# Altium integrated library Capacitor.IntLib: 81 symbols (part 2 of 2)
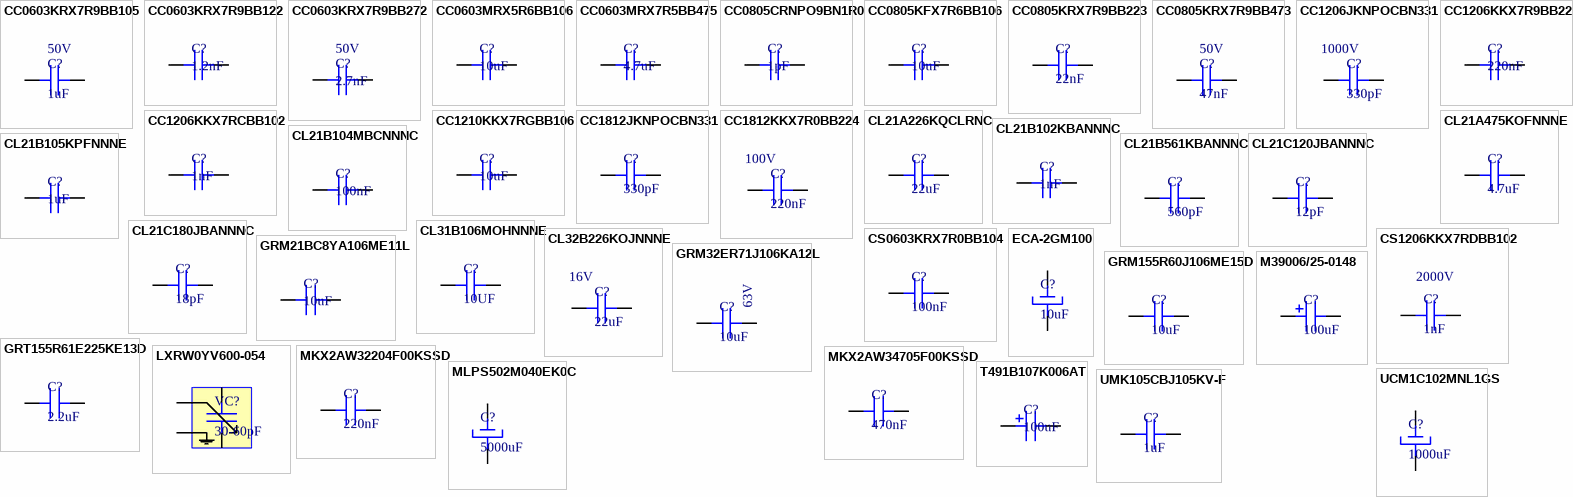
[diagram p3: symbols CC0603KRX7R9BB105 to UMK105CBJ105KV-F]

## GRM21BC8YA106ME11L
designator C?, comment 10uF
10uF, 35V, X6S, 0805; Manufacturer: Murata; Manufacturer Part Number: GRM21BC8YA106ME11L; Tolerance: 20%; Value: 10000000; Dielectric Material: Ceramic; Purpose Of Usage: BASIC; Working Voltage: 0; Supplier 1: Digi-Key; Supplier Part Number 1: 490-10505-1-ND; RoHS: YES; Mount: SMD; Case/Package: 0805; Case Code (Imperial): 0805; Case Code (Metric): 2012; Min Operating Temperature: -55°C; Max Operating Temperature: 105°C; Voltage Rating: 35V; Voltage Rating (DC): 35V; Dielectric: X6S; Category: CAPASITOR; Sub-Category: CERAMIC; Stock ID: ??; Local Supplier: GENERAL; Price 10K: 0.00250
footprint C0805
pins: 1, 2

## GRM32ER71J106KA12L
designator C?, comment 10uF  Voltage Rating: 63V
10uF , 1210,  X7R, 63V; Manufacturer: Murata; Manufacturer Part Number: GRM32ER71J106KA12L; Dielectric Material: Ceramic; Purpose Of Usage: BASIC; Tolerance: 10%; Value: 100000000; Working Voltage: 0; RoHS: YES; Category: CAPASITOR; Case/Package: 1210; Case Code (Imperial): 1210; Case Code (Metric): 3225; Dielectric: X7R; Local Supplier: GENERAL; Max Operating Temperature: 125°C; Min Operating Temperature: -55°C; Mount: SMD; Price 10K: 0,5; Stock ID: ??; Sub-Category: CERAMIC; Supplier 1: Digi-Key; Voltage Rating (DC): 63V
footprint C1210
pins: 1, 2

## GRM155R60J106ME15D
designator C?, comment 10uF
10uF, 6.3V, X5R, 0402; Manufacturer: Murata; Manufacturer Part Number: GRM155R60J106ME15D; Value: 10000000; Tolerance: 20%; Dielectric Material: Ceramic; Purpose Of Usage: BASIC; Working Voltage: 0; Supplier 1: Digi-Key; RoHS: YES; Category: CAPASITOR; Mount: SMD; Case/Package: 0402; Case Code (Metric): 1005; Case Code (Imperial): 0402; Min Operating Temperature: -55°C; Max Operating Temperature: 85°C; Voltage Rating: 6.3V; Voltage Rating (DC): 6.3V; Dielectric: X5R; Supplier Part Number 1: 490-13238-1-ND; Sub-Category: CERAMIC; Stock ID: ??; Local Supplier: GENERAL; Price 10K: 0.00250
footprint C0402 (Chip Capacitor, 2-Leads, Body 1.00x0.50mm, IPC Medium Density)
pins: 1, 2

## GRT155R61E225KE13D
designator C?, comment 2.2uF
2.2uF, 25V, X5R, 0402; Manufacturer: Murata; Manufacturer Part Number: GRT155R61E225KE13D; Value: 2200000; Tolerance: 10%; Dielectric Material: Ceramic; Purpose Of Usage: BASIC; Working Voltage: 0; Supplier 1: Digi-Key; RoHS: YES; Category: CAPASITOR; Mount: SMD; Case/Package: 0402; Case Code (Metric): 1005; Case Code (Imperial): 0402; Min Operating Temperature: -55°C; Max Operating Temperature: 85°C; Voltage Rating: 25V; Dielectric: X5R; Voltage Rating (DC): 25V; Supplier Part Number 1: 490-12267-1-ND; Sub-Category: CERAMIC; Stock ID: ??; Local Supplier: GENERAL; Price 10K: 0.00250
footprint C0402 (Chip Capacitor, 2-Leads, Body 1.00x0.50mm, IPC Medium Density)
pins: 1, 2

## LXRW0YV600-054
designator VC?, comment 30-60pF
60pF 3.2V 4-Pin Surface Mount T/R; Manufacturer: Murata; Manufacturer Part Number: LXRW0YV600-054; Value: 30; Voltage Rating: 50V; Purpose Of Usage: BASIC; Working Voltage: 0; Supplier 1: Digi-Key; RoHS: YES; Category: CAPASITOR; Supplier Part Number 1: 490-18379-2-ND; Case/Package: SMD/SMT; Case Code (Imperial): SMD; Max Operating Temperature: 85°C; Min Operating Temperature: -55°C; Mount: SMD; Stock ID: ??; Sub-Category: TRIMMER; Voltage Rating (DC): 3.2V; Local Supplier: GENERAL; Price 10K: 0.00250
footprint LXRW0YV600-054
pins: 1 GND, 2 ADJ, 3, 4

## M39006/25-0148
designator C?, comment 100uF
100uF, 63V, %10, ,WetTantalum, THT, MIL-PRF-39006; Manufacturer: Vishay Sprague; Manufacturer Part Number: M39006/25-0148; Voltage Rating: 60V; Tolerance: 10%; Value: 100000000; Purpose Of Usage: BASIC; Working Voltage: 0; RoHS: YES; Category: CAPASITOR; Case/Package: Axial; Min Operating Temperature: -55°C; Max Operating Temperature: 125°C; Mount: SMD; Supplier 1: Digi-Key; Case Code (Imperial): THT; Case Code (Metric): THT; Diameter: 7.92mm; Dielectric: Tantalum; Dielectric Material: Tantalum; Height: 7.92mm; Stock ID: ??; Sub-Category: TANTALUM; Supplier Part Number 1: 1129-M39006/25-0148-ND; Voltage Rating (DC): 60V
footprint CAP_06/22-0002_VIS
pins: 1, 2

## MKX2AW32204F00KSSD
designator C?, comment 220nF
220nF, 630V, %10, THT, X2; Manufacturer: WIMA; Manufacturer Part Number: MKX2AW32204F00KSSD; Dielectric: Polypropylene (PP), Metallized; Purpose Of Usage: BASIC; Tolerance: 10%; Value: 220000; Working Voltage: 0; RoHS: YES; Category: CAPASITOR; Case/Package: Radial; Case Code (Imperial): THT; Case Code (Metric): Radial; Dielectric Material: Polypropylene (PP), Metallized; Height: 15mm; Local Supplier: GENERAL; Max Operating Temperature: 105°C; Min Operating Temperature: -55°C; Mount: THT; MSL: 1; Stock ID: ??; Sub-Category: FILM CAPASITOR; Supplier 1: Digi-Key; Supplier Part Number 1: 1928-1773-ND; Voltage Rating (DC): 630V; Voltage Rating: 630V; Price 10K: 0,5
footprint 18x9x15_L15_Film_Cap
pins: 1, 2

## MKX2AW34705F00KSSD
designator C?, comment 470nF
470nF, 630V, %10, THT, X2; Manufacturer: WIMA; Manufacturer Part Number: MKX2AW34705F00KSSD; Dielectric Material: PP; Tolerance: 10%; Value: 470000; Dielectric: Polypropylene (PP), Metallized; Purpose Of Usage: BASIC; Voltage Rating (DC): 560 V; Working Voltage: 0; RoHS: YES; Category: CAPASITOR; Case/Package: Radial; Min Operating Temperature: -55°C; Max Operating Temperature: 105°C; Case Code (Imperial): THT; Case Code (Metric): THT; Height: 18.5mm; Local Supplier: GENERAL; Mount: THT; Price 10K: 0,5; Stock ID: ??; Sub-Category: FILM CAPASITOR; Supplier 1: Digi-Key; Supplier Part Number 1: 1928-MKX2AW34705F00KSSD-ND; Voltage Rating: 560 V
footprint 26x9x18_L15_Film_Cap
pins: 1, 2

## MLPS502M040EK0C
designator C?, comment 5000uF
5000uF, 40V, ALU, THT; Manufacturer: Cornell Dubilier; Manufacturer Part Number: MLPS502M040EK0C; Dielectric: Polymer; Dielectric Material: Aluminium; Purpose Of Usage: BASIC; Tolerance: 20%; Value: 5000000000; Working Voltage: 0; RoHS: YES; Case/Package: Axial; Case Code (Imperial): THT; Case Code (Metric): Style C; Category: CAPASITOR; Height: 15.4mmmmm; Max Operating Temperature: 105°C; Min Operating Temperature: -55°C; Mount: THT; Stock ID: ??; Sub-Category: ALUMINUM; Supplier 1: Digi-Key; Supplier Part Number 1: 338-MLPS502M040EK0C-ND; Voltage Rating (DC): 40V; Voltage Rating: 40V
footprint Cap_EK0C
pins: 1, 2

## T491B107K006AT
designator C?, comment 100uF
100uF, 6V, Tantalum ,Case B; Manufacturer: KEMET; Manufacturer Part Number: T491B107K006AT; Value: 100000000; Voltage Rating: 6.3V; Tolerance: 10%; Purpose Of Usage: BASIC; Working Voltage: 0; Supplier 1: Digi-Key; Supplier Part Number 1: 399-8301-1-ND; RoHS: YES; Mount: SMD; Case/Package: 1411; Dielectric Material: Tantalum; Case Code (Imperial): 1411; Case Code (Metric): 3528; Min Operating Temperature: -55°C; Max Operating Temperature: 125°C; Voltage Rating (DC): 6V; Height: 1.9mm; Category: CAPASITOR; Sub-Category: TANTALUM; Dielectric: Tantalum; Stock ID: ??; Local Supplier: GENERAL; Price 10K: 0.00250
footprint CT3528
pins: 1, 2

## UCM1C102MNL1GS
designator C?, comment 1000uF
1000uF, 16V, ELC, 10mm SMD; Manufacturer: Nichicon; Manufacturer Part Number: UCM1C102MNL1GS; Value: 1000000000; Tolerance: 20%; Dielectric: Polymer; Dielectric Material: Aluminium; Purpose Of Usage: BASIC; Working Voltage: 0; Supplier 1: Digi-Key; Supplier Part Number 1: 493-14526-1-ND; RoHS: YES; Mount: SMD; Case/Package: SMD/SMT; Min Operating Temperature: -55°C; Max Operating Temperature: 105°C; Voltage Rating: 16V; Voltage Rating (DC): 16V; Diameter: 10mm; Height: 10mm; Category: CAPASITOR; Sub-Category: ALUMINUM; Stock ID: ??; Case Code (Imperial): 10mm; Local Supplier: GENERAL; Price 10K: 0.00250
footprint 10mm Aliminyum Smd
pins: 1, 2

## UMK105CBJ105KV-F
designator C?, comment 1uF
1uF, 50V, X5R, 0402; Manufacturer: Taiyo Yuden; Manufacturer Part Number: UMK105CBJ105KV-F; Tolerance: 10%; Dielectric Material: Ceramic; Value: 1000000; Purpose Of Usage: BASIC; Working Voltage: 0; Supplier 1: Digi-Key; Category: CAPASITOR; Case/Package: 0402; Min Operating Temperature: -55°C; Max Operating Temperature: 85°C; Voltage Rating: 50V; Supplier Part Number 1: 587-UMK105CBJ105KV-FCT-ND; Case Code (Imperial): 0402; Case Code (Metric): 1005; Dielectric: X5R; Mount: SMD; RoHS: YES; Stock ID: ??; Sub-Category: CERAMIC; Local Supplier: GENERAL; Price 10K: 0.00250; Voltage Rating (DC): 50V
footprint C0402 (Chip Capacitor, 2-Leads, Body 1.00x0.50mm, IPC Medium Density)
pins: 1, 2

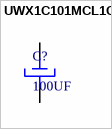
[diagram p2: symbol UWX1C101MCL1GB]

## UWX1C101MCL1GB
designator C?, comment 100UF
100uF, 16V, ELC, 6.3mm SMD; Manufacturer: Nichicon; Manufacturer Part Number: UWX1C101MCL1GB; Dielectric Material: Aluminium; Value: 100000000; Tolerance: 20%; Dielectric: Polymer; Purpose Of Usage: BASIC; Working Voltage: 0; Supplier 1: Digi-Key; Supplier Part Number 1: 493-2105-1-ND; RoHS: YES; Mount: SMD; Case/Package: Radial; Min Operating Temperature: -40°C; Max Operating Temperature: 85°C; Voltage Rating: 16V; Voltage Rating (DC): 16V; Diameter: 6.3mm; Height: 5.5mm; Category: CAPASITOR; Sub-Category: ALUMINUM; Stock ID: ??; Case Code (Imperial): 6.3 mm; Local Supplier: GENERAL; Price 10K: 0.00250
footprint 6mm Aliminyum Smd
pins: 1, 2